# Altium footprint library NHD0216K1ZFSBFBWL.PcbLib: 1 footprints
Each footprint in its own frame and in the unit in brackets; x right, y up, seen from the top. Pads: shape width x height; smd on the part's side, far side on the other; paste and mask are expansions set on the pad; w line width, h text height; cw(c..) or ccw(c..) is an arc to the next point about the centre after c.
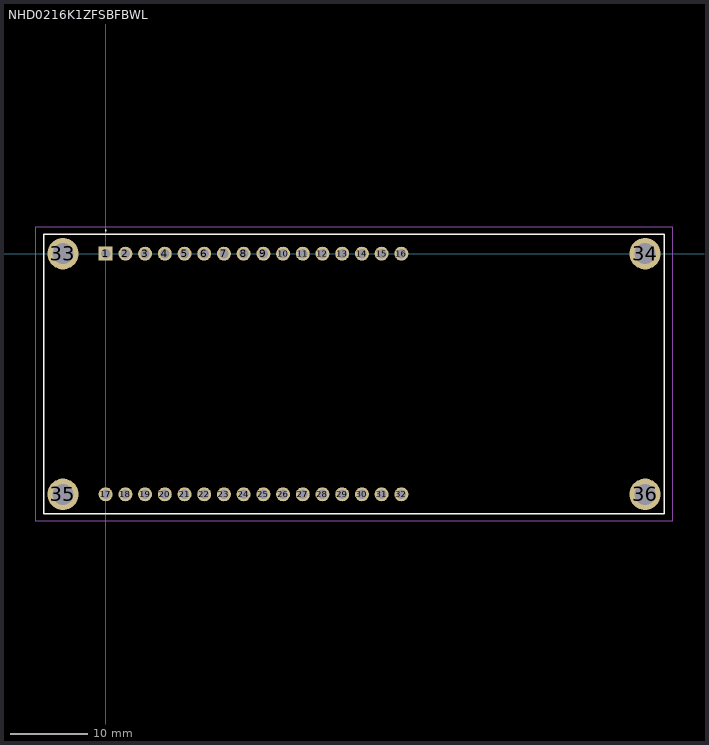
[diagram p0: the footprint, top view; thin cyan lines are the x and y axes]

## NHD0216K1ZFSBFBWL [mm]
pads (36):
  rect 1.8x1.8 hole 1.2: 1(0,0)
  round 1.8 hole 1.2: 2(2.54,0) 3(5.08,0) 4(7.62,0) 5(10.16,0) 6(12.7,0) 7(15.24,0) 8(17.78,0) 9(20.32,0) 10(22.86,0) 11(25.4,0) 12(27.94,0) 13(30.48,0) 14(33.02,0) 15(35.56,0) 16(38.1,0) 17(0,-31) 18(2.54,-31) 19(5.08,-31) 20(7.62,-31) 21(10.16,-31) 22(12.7,-31) 23(15.24,-31) 24(17.78,-31) 25(20.32,-31) 26(22.86,-31) 27(25.4,-31) 28(27.94,-31) 29(30.48,-31) 30(33.02,-31) 31(35.56,-31) 32(38.1,-31)
  round 4.05 hole 2.7: 33(-5.5,0) 34(69.5,0) 35(-5.5,-31) 36(69.5,-31)
Top Overlay:
  lines w0.1: 0,2.95 cw(c0,3) 0,3.05 ; 0,2.95 0,2.95 ; 0,2.95 ccw(c0,3) 0,3.05 ; 0,3.05 0,3.05
  lines w0.2: -8,-33.5 72,-33.5 72,2.5 -8,2.5 -8,-33.5
Mechanical 15:
  lines w0.1: -8,-33.5 72,-33.5 72,2.5 -8,2.5 -8,-33.5
Mechanical 20:
  lines w0.1: -9,-34.5 73,-34.5 73,3.5 -9,3.5 -9,-34.5